# Altium schematic symbol library BMS 2S.SchLib: 1 symbol
Pins are listed as number, name and electrical type; pins without a type are passive.

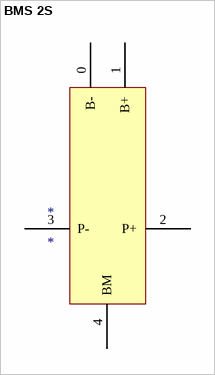
[diagram p0: symbol BMS 2S]

## BMS 2S
designator *
pins: 0 B-, 1 B+, 2 P+, 3 P-, 4 BM